# Altium integrated library Altium_Power_Supply_IC.IntLib: 99 symbols (part 3 of 3)
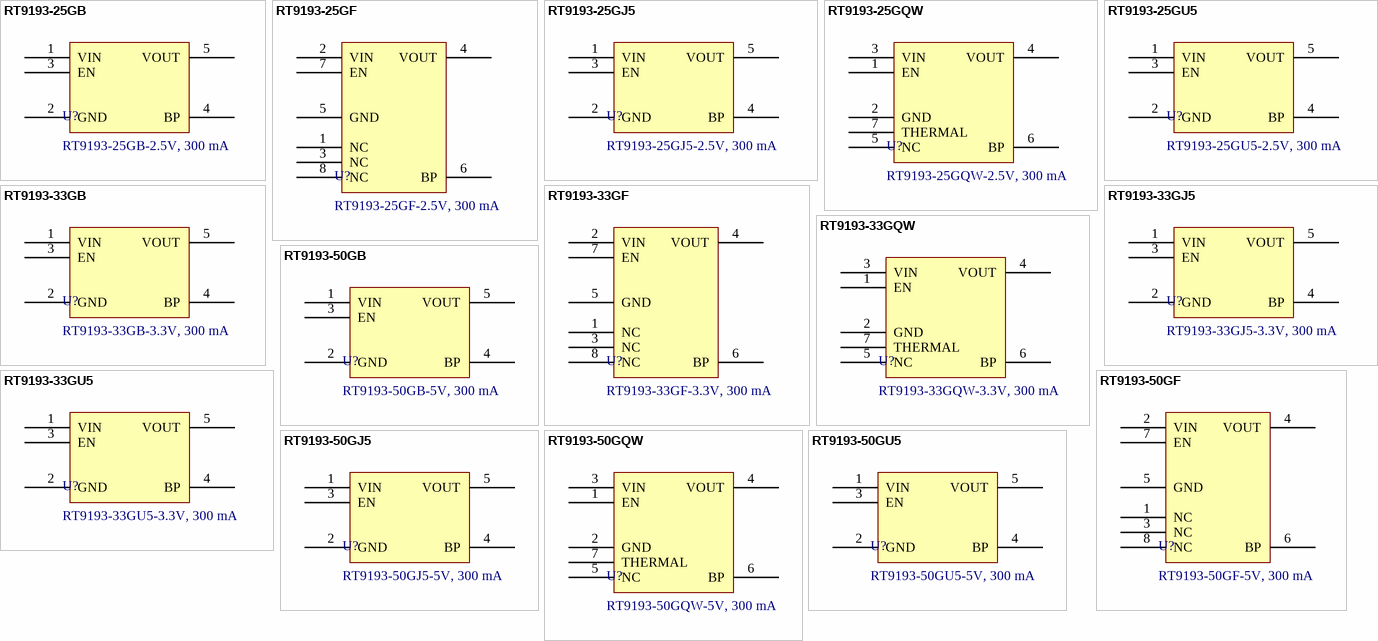
[diagram p13: symbols RT9193-25GB to RT9193-50GU5]

## RT9193-25GJ5
designator U?, comment RT9193-25GJ5-2.5V, 300 mA
LDO Voltage Regulators 300mA, Ultra-Low Noise, Ultra-Fast CMOS LDO Regulator, TSOT-23-5, 2.5V; Manufacturer: Richtek; Rated Current: 90 uA; PSRR: - 70 dB; Voltage Drop: 220 mV; Voltage Input Maximum: 5.5V; Product: LDO Voltage Regulators; Packaging: Tape and Reel; Voltage Output: 2.5V; Current Output: 300 mA; Voltage Input Minimum: 2.5V; Supplier 1 URL: N/A; Supplier 2 URL: https://www.digikey.com/en/products/detail/richtek-usa-inc/RT9193-25GJ5/2546925?s=N4IgTCBcDaIEoBUCcBGJBmAtGArAcQCkcQBdAXyA; Supplier 3 URL: N/A; Value: RT9193-25GJ5-2.5V, 300 mA; Manufacturer Part Number: RT9193-25GJ5; Mount: SMD/SMT; Operating Temperature Max: + 85 C; Operating Temperature Min: - 40 C; Package / Case: TSOT-23-5; Supplier 1: Mouser; Supplier 1 Part Number: N/A; Supplier 2: Digi-Key; Supplier 2 Part Number: RT9193-25GJ5-ND; Supplier 3: thegioiic; Supplier 3 Part Number: N/A; ComponentLink1Description: Datasheet; ComponentLink1URL: https://www.mouser.vn/datasheet/2/1458/DS9193_18-3104722.pdf; LCSC Part #: N/A
footprint RT9193-xxGJ5 (SOT23, 5-Leads, Body 2.90x2.80mm, Pitch 0.95mm, IPC Medium Density)
pins: 1 VIN (power), 2 GND (power), 3 EN (power), 4 BP (power), 5 VOUT (power)

## RT9193-25GQW
designator U?, comment RT9193-25GQW-2.5V, 300 mA
LDO Voltage Regulators 300mA, Ultra-Low Noise, Ultra-Fast CMOS LDO Regulator, WDFN-6L 2x2 (W-Type), 2.5V; Manufacturer: Richtek; Rated Current: 90 uA; PSRR: - 70 dB; Voltage Drop: 220 mV; Voltage Input Maximum: 5.5V; Product: LDO Voltage Regulators; Packaging: Tape and Reel; Voltage Output: 2.5V; Current Output: 300 mA; Voltage Input Minimum: 2.5V; Supplier 1 URL: N/A; Supplier 2 URL: https://www.digikey.com/en/products/detail/richtek-usa-inc/RT9193-25GQW/2546927?s=N4IgTCBcDaIEoBUCcBGJBmAtGArAcQEUB1EAXQF8g; Supplier 3 URL: N/A; Value: RT9193-25GQW-2.5V, 300 mA; Manufacturer Part Number: RT9193-25GQW; Mount: SMD/SMT; Operating Temperature Max: + 85 C; Operating Temperature Min: - 40 C; Package / Case: WDFN-6L 2x2 (W-Type); Supplier 1: Mouser; Supplier 1 Part Number: N/A; Supplier 2: Digi-Key; Supplier 2 Part Number: RT9193-25GQW-ND; Supplier 3: thegioiic; Supplier 3 Part Number: N/A; ComponentLink1Description: Datasheet; ComponentLink1URL: https://www.mouser.vn/datasheet/2/1458/DS9193_18-3104722.pdf; LCSC Part #: N/A
footprint RT9193-xxGQW (SON, 6-Leads, Body 2.00x2.00mm, Pitch 0.65mm, Thermal Pad 1.23x0.68mm, IPC Medium Density)
pins: 1 EN (power), 2 GND (power), 3 VIN (power), 4 VOUT (power), 5 NC (power), 6 BP (power), 7 THERMAL (power)

## RT9193-25GU5
designator U?, comment RT9193-25GU5-2.5V, 300 mA
LDO Voltage Regulators 300mA, Ultra-Low Noise, Ultra-Fast CMOS LDO Regulator, SC-70-5, 2.5V; Manufacturer: Richtek; Rated Current: 90 uA; PSRR: - 70 dB; Voltage Drop: 220 mV; Voltage Input Maximum: 5.5V; Product: LDO Voltage Regulators; Packaging: Tape and Reel; Voltage Output: 2.5V; Current Output: 300 mA; Voltage Input Minimum: 2.5V; Supplier 1 URL: N/A; Supplier 2 URL: https://www.digikey.com/en/products/detail/richtek-usa-inc/RT9193-25GU5/2546929?s=N4IgTCBcDaIEoBUCcBGJBmAtGArAcQFUcQBdAXyA; Supplier 3 URL: N/A; Value: RT9193-25GU5-2.5V, 300 mA; Manufacturer Part Number: RT9193-25GU5; Mount: SMD/SMT; Operating Temperature Max: + 85 C; Operating Temperature Min: - 40 C; Package / Case: SC-70-5; Supplier 1: Mouser; Supplier 1 Part Number: N/A; Supplier 2: Digi-Key; Supplier 2 Part Number: RT9193-25GU5-ND; Supplier 3: thegioiic; Supplier 3 Part Number: N/A; ComponentLink1Description: Datasheet; ComponentLink1URL: https://www.mouser.vn/datasheet/2/1458/DS9193_18-3104722.pdf; LCSC Part #: N/A
footprint RT9193-xxGU5 (SOT23, 5-Leads, Body 2.03x2.13mm, Pitch 0.65mm, IPC Medium Density)
pins: 1 VIN (power), 2 GND (power), 3 EN (power), 4 BP (power), 5 VOUT (power)

## RT9193-33GB
designator U?, comment RT9193-33GB-3.3V, 300 mA
LDO Voltage Regulators 300mA, Ultra-Low Noise, Ultra-Fast CMOS LDO Regulator, SOT-23-5,  3.3 V; Manufacturer: Richtek; Voltage Output: 3.3V; Rated Current: 90 uA; Voltage Input Minimum: 2.5V; PSRR: - 70 dB; Voltage Drop: 220 mV; Voltage Input Maximum: 5.5V; Packaging: Tape and Reel; Current Output: 300 mA; Product: LDO Voltage Regulators; Supplier 1 URL: https://www.mouser.vn/ProductDetail/Richtek/RT9193-33GB?qs=amGC7iS6iy8ybRcZ9Wn2ww%3D%3D; Supplier 2 URL: https://www.digikey.com/en/products/detail/richtek-usa-inc/RT9193-33GB/2470048?s=N4IgTCBcDaIEoBUCcBGJBmAtO9BxAQiALoC%2BQA; Supplier 3 URL: N/A; Value: RT9193-33GB-3.3V, 300 mA; Manufacturer Part Number: RT9193-33GB; Mount: SMD/SMT; Operating Temperature Max: + 85 C; Operating Temperature Min: - 40 C; Package / Case: SOT-23-5; Supplier 1: Mouser; Supplier 1 Part Number: 835-RT9193-33GB; Supplier 2: Digi-Key; Supplier 2 Part Number: 1028-1014-6-ND; Supplier 3: thegioiic; Supplier 3 Part Number: N/A; ComponentLink1Description: Datasheet; ComponentLink1URL: https://www.mouser.vn/datasheet/2/1458/DS9193_18-3104722.pdf; LCSC Part #: C15651
footprint RT9193-xxGB (SOT23, 5-Leads, Body 2.90x2.79mm, Pitch 0.95mm, IPC Medium Density)
pins: 1 VIN (power), 2 GND (power), 3 EN (power), 4 BP (power), 5 VOUT (power)

## RT9193-33GF
designator U?, comment RT9193-33GF-3.3V, 300 mA
LDO Voltage Regulators 300mA, Ultra-Low Noise, Ultra-Fast CMOS LDO Regulator, MSOP-8, 3.3V; Manufacturer: Richtek; Rated Current: 90 uA; Voltage Input Minimum: 2.5V; PSRR: - 70 dB; Voltage Drop: 220 mV; Voltage Input Maximum: 5.5V; Product: LDO Voltage Regulators; Packaging: Tape and Reel; Voltage Output: 3.3V; Current Output: 300 mA; Supplier 1 URL: N/A; Supplier 2 URL: https://www.digikey.com/en/products/detail/richtek-usa-inc/RT9193-33GF/2546969?s=N4IgTCBcDaIEoBUCcBGJBmAtO9BxAYiALoC%2BQA; Supplier 3 URL: N/A; Value: RT9193-33GF-3.3V, 300 mA; Manufacturer Part Number: RT9193-33GF; Mount: SMD/SMT; Operating Temperature Max: + 85 C; Operating Temperature Min: - 40 C; Package / Case: MSOP-8; Supplier 1: Mouser; Supplier 1 Part Number: N/A; Supplier 2: Digi-Key; Supplier 2 Part Number: 1028-RT9193-33GFTR-ND; Supplier 3: thegioiic; Supplier 3 Part Number: N/A; ComponentLink1Description: Datasheet; ComponentLink1URL: https://www.mouser.vn/datasheet/2/1458/DS9193_18-3104722.pdf; LCSC Part #: N/A
footprint RT9193-xxGF (TSOP, 8-Leads, Body 3.00x3.00mm, Pitch 0.65mm, IPC Medium Density)
pins: 1 NC (power), 2 VIN (power), 3 NC (power), 4 VOUT (power), 5 GND (power), 6 BP (power), 7 EN (power), 8 NC (power)

## RT9193-33GJ5
designator U?, comment RT9193-33GJ5-3.3V, 300 mA
LDO Voltage Regulators 300mA, Ultra-Low Noise, Ultra-Fast CMOS LDO Regulator, TSOT-23-5, 3.3V; Manufacturer: Richtek; Rated Current: 90 uA; Voltage Input Minimum: 2.5V; PSRR: - 70 dB; Voltage Drop: 220 mV; Voltage Input Maximum: 5.5V; Product: LDO Voltage Regulators; Packaging: Tape and Reel; Voltage Output: 3.3V; Current Output: 300 mA; Supplier 1 URL: N/A; Supplier 2 URL: https://www.digikey.com/en/products/detail/richtek-usa-inc/RT9193-33GJ5/2546971?s=N4IgTCBcDaIEoBUCcBGJBmAtO9BxAUgKwgC6AvkA; Supplier 3 URL: N/A; Value: RT9193-33GJ5-3.3V, 300 mA; Manufacturer Part Number: RT9193-33GJ5; Mount: SMD/SMT; Operating Temperature Max: + 85 C; Operating Temperature Min: - 40 C; Package / Case: TSOT-23-5; Supplier 1: Mouser; Supplier 1 Part Number: N/A; Supplier 2: Digi-Key; Supplier 2 Part Number: RT9193-33GJ5-ND; Supplier 3: thegioiic; Supplier 3 Part Number: N/A; ComponentLink1Description: Datasheet; ComponentLink1URL: https://www.mouser.vn/datasheet/2/1458/DS9193_18-3104722.pdf; LCSC Part #: N/A
footprint RT9193-xxGJ5 (SOT23, 5-Leads, Body 2.90x2.80mm, Pitch 0.95mm, IPC Medium Density)
pins: 1 VIN (power), 2 GND (power), 3 EN (power), 4 BP (power), 5 VOUT (power)

## RT9193-33GQW
designator U?, comment RT9193-33GQW-3.3V, 300 mA
LDO Voltage Regulators 300mA, Ultra-Low Noise, Ultra-Fast CMOS LDO Regulator, WDFN-6L 2x2 (W-Type), 3.3V; Manufacturer: Richtek; Rated Current: 90 uA; Voltage Input Minimum: 2.5V; PSRR: - 70 dB; Voltage Drop: 220 mV; Voltage Input Maximum: 5.5V; Product: LDO Voltage Regulators; Packaging: Tape and Reel; Voltage Output: 3.3V; Current Output: 300 mA; Supplier 1 URL: N/A; Supplier 2 URL: https://www.digikey.com/en/products/detail/richtek-usa-inc/RT9193-33GQW/2546973?s=N4IgTCBcDaIEoBUCcBGJBmAtO9BxAigOogC6AvkA; Supplier 3 URL: N/A; Value: RT9193-33GQW-3.3V, 300 mA; Manufacturer Part Number: RT9193-33GQW; Mount: SMD/SMT; Operating Temperature Max: + 85 C; Operating Temperature Min: - 40 C; Package / Case: WDFN-6L 2x2 (W-Type); Supplier 1: Mouser; Supplier 1 Part Number: N/A; Supplier 2: Digi-Key; Supplier 2 Part Number: RT9193-33GQW-ND; Supplier 3: thegioiic; Supplier 3 Part Number: N/A; ComponentLink1Description: Datasheet; ComponentLink1URL: https://www.mouser.vn/datasheet/2/1458/DS9193_18-3104722.pdf; LCSC Part #: N/A
footprint RT9193-xxGQW (SON, 6-Leads, Body 2.00x2.00mm, Pitch 0.65mm, Thermal Pad 1.23x0.68mm, IPC Medium Density)
pins: 1 EN (power), 2 GND (power), 3 VIN (power), 4 VOUT (power), 5 NC (power), 6 BP (power), 7 THERMAL (power)

## RT9193-33GU5
designator U?, comment RT9193-33GU5-3.3V, 300 mA
LDO Voltage Regulators 300mA, Ultra-Low Noise, Ultra-Fast CMOS LDO Regulator, SC-70-5, 3.3V; Manufacturer: Richtek; Rated Current: 90 uA; Voltage Input Minimum: 2.5V; PSRR: - 70 dB; Voltage Drop: 220 mV; Voltage Input Maximum: 5.5V; Product: LDO Voltage Regulators; Packaging: Tape and Reel; Voltage Output: 3.3V; Current Output: 300 mA; Supplier 1 URL: N/A; Supplier 2 URL: https://www.digikey.com/en/products/detail/richtek-usa-inc/RT9193-33GU5/2546976?s=N4IgTCBcDaIEoBUCcBGJBmAtO9BxAqgKwgC6AvkA; Supplier 3 URL: N/A; Value: RT9193-33GU5-3.3V, 300 mA; Manufacturer Part Number: RT9193-33GU5; Mount: SMD/SMT; Operating Temperature Max: + 85 C; Operating Temperature Min: - 40 C; Package / Case: SC-70-5; Supplier 1: Mouser; Supplier 1 Part Number: N/A; Supplier 2: Digi-Key; Supplier 2 Part Number: RT9193-33GU5-ND; Supplier 3: thegioiic; Supplier 3 Part Number: N/A; ComponentLink1Description: Datasheet; ComponentLink1URL: https://www.mouser.vn/datasheet/2/1458/DS9193_18-3104722.pdf; LCSC Part #: N/A
footprint RT9193-xxGU5 (SOT23, 5-Leads, Body 2.03x2.13mm, Pitch 0.65mm, IPC Medium Density)
pins: 1 VIN (power), 2 GND (power), 3 EN (power), 4 BP (power), 5 VOUT (power)

## RT9193-50GB
designator U?, comment RT9193-50GB-5V, 300 mA
LDO Voltage Regulators 300mA, Ultra-Low Noise, Ultra-Fast CMOS LDO Regulator, SOT-23-5, 5V; Manufacturer: Richtek; Rated Current: 90 uA; Voltage Input Minimum: 2.5V; PSRR: - 70 dB; Voltage Drop: 220 mV; Voltage Input Maximum: 5.5V; Product: LDO Voltage Regulators; Packaging: Tape and Reel; Voltage Output: 5V; Current Output: 300 mA; Supplier 1 URL: N/A; Supplier 2 URL: N/A; Supplier 3 URL: N/A; Value: RT9193-50GB-5V, 300 mA; Manufacturer Part Number: RT9193-50GB; Mount: SMD/SMT; Operating Temperature Max: + 85 C; Operating Temperature Min: - 40 C; Package / Case: SOT-23-5; Supplier 1: Mouser; Supplier 1 Part Number: N/A; Supplier 2: Digi-Key; Supplier 2 Part Number: N/A; Supplier 3: thegioiic; Supplier 3 Part Number: N/A; ComponentLink1Description: Datasheet; ComponentLink1URL: https://www.mouser.vn/datasheet/2/1458/DS9193_18-3104722.pdf; LCSC Part #: N/A
footprint RT9193-xxGB (SOT23, 5-Leads, Body 2.90x2.79mm, Pitch 0.95mm, IPC Medium Density)
pins: 1 VIN (power), 2 GND (power), 3 EN (power), 4 BP (power), 5 VOUT (power)

## RT9193-50GF
designator U?, comment RT9193-50GF-5V, 300 mA
LDO Voltage Regulators 300mA, Ultra-Low Noise, Ultra-Fast CMOS LDO Regulator, MSOP-8, 5V; Manufacturer: Richtek; Rated Current: 90 uA; Voltage Input Minimum: 2.5V; PSRR: - 70 dB; Voltage Drop: 220 mV; Voltage Input Maximum: 5.5V; Product: LDO Voltage Regulators; Packaging: Tape and Reel; Voltage Output: 5V; Current Output: 300 mA; Supplier 1 URL: N/A; Supplier 2 URL: N/A; Supplier 3 URL: N/A; Value: RT9193-50GF-5V, 300 mA; Manufacturer Part Number: RT9193-50GF; Mount: SMD/SMT; Operating Temperature Max: + 85 C; Operating Temperature Min: - 40 C; Package / Case: MSOP-8; Supplier 1: Mouser; Supplier 1 Part Number: N/A; Supplier 2: Digi-Key; Supplier 2 Part Number: N/A; Supplier 3: thegioiic; Supplier 3 Part Number: N/A; ComponentLink1Description: Datasheet; ComponentLink1URL: https://www.mouser.vn/datasheet/2/1458/DS9193_18-3104722.pdf; LCSC Part #: N/A
footprint RT9193-xxGF (TSOP, 8-Leads, Body 3.00x3.00mm, Pitch 0.65mm, IPC Medium Density)
pins: 1 NC (power), 2 VIN (power), 3 NC (power), 4 VOUT (power), 5 GND (power), 6 BP (power), 7 EN (power), 8 NC (power)

## RT9193-50GJ5
designator U?, comment RT9193-50GJ5-5V, 300 mA
LDO Voltage Regulators 300mA, Ultra-Low Noise, Ultra-Fast CMOS LDO Regulator, TSOT-23-5, 5V; Manufacturer: Richtek; Rated Current: 90 uA; Voltage Input Minimum: 2.5V; PSRR: - 70 dB; Voltage Drop: 220 mV; Voltage Input Maximum: 5.5V; Product: LDO Voltage Regulators; Packaging: Tape and Reel; Voltage Output: 5V; Current Output: 300 mA; Supplier 1 URL: N/A; Supplier 2 URL: N/A; Supplier 3 URL: N/A; Value: RT9193-50GJ5-5V, 300 mA; Manufacturer Part Number: RT9193-50GJ5; Mount: SMD/SMT; Operating Temperature Max: + 85 C; Operating Temperature Min: - 40 C; Package / Case: TSOT-23-5; Supplier 1: Mouser; Supplier 1 Part Number: N/A; Supplier 2: Digi-Key; Supplier 2 Part Number: N/A; Supplier 3: thegioiic; Supplier 3 Part Number: N/A; ComponentLink1Description: Datasheet; ComponentLink1URL: https://www.mouser.vn/datasheet/2/1458/DS9193_18-3104722.pdf; LCSC Part #: N/A
footprint RT9193-xxGJ5 (SOT23, 5-Leads, Body 2.90x2.80mm, Pitch 0.95mm, IPC Medium Density)
pins: 1 VIN (power), 2 GND (power), 3 EN (power), 4 BP (power), 5 VOUT (power)

## RT9193-50GQW
designator U?, comment RT9193-50GQW-5V, 300 mA
LDO Voltage Regulators 300mA, Ultra-Low Noise, Ultra-Fast CMOS LDO Regulator, WDFN-6L 2x2 (W-Type), 5V; Manufacturer: Richtek; Rated Current: 90 uA; Voltage Input Minimum: 2.5V; PSRR: - 70 dB; Voltage Drop: 220 mV; Voltage Input Maximum: 5.5V; Product: LDO Voltage Regulators; Packaging: Tape and Reel; Voltage Output: 5V; Current Output: 300 mA; Supplier 1 URL: N/A; Supplier 2 URL: N/A; Supplier 3 URL: N/A; Value: RT9193-50GQW-5V, 300 mA; Manufacturer Part Number: RT9193-50GQW; Mount: SMD/SMT; Operating Temperature Max: + 85 C; Operating Temperature Min: - 40 C; Package / Case: WDFN-6L 2x2 (W-Type); Supplier 1: Mouser; Supplier 1 Part Number: N/A; Supplier 2: Digi-Key; Supplier 2 Part Number: N/A; Supplier 3: thegioiic; Supplier 3 Part Number: N/A; ComponentLink1Description: Datasheet; ComponentLink1URL: https://www.mouser.vn/datasheet/2/1458/DS9193_18-3104722.pdf; LCSC Part #: N/A
footprint RT9193-xxGQW (SON, 6-Leads, Body 2.00x2.00mm, Pitch 0.65mm, Thermal Pad 1.23x0.68mm, IPC Medium Density)
pins: 1 EN (power), 2 GND (power), 3 VIN (power), 4 VOUT (power), 5 NC (power), 6 BP (power), 7 THERMAL (power)

## RT9193-50GU5
designator U?, comment RT9193-50GU5-5V, 300 mA
LDO Voltage Regulators 300mA, Ultra-Low Noise, Ultra-Fast CMOS LDO Regulator, SC-70-5, 5V; Manufacturer: Richtek; Rated Current: 90 uA; Voltage Input Minimum: 2.5V; PSRR: - 70 dB; Voltage Drop: 220 mV; Voltage Input Maximum: 5.5V; Product: LDO Voltage Regulators; Packaging: Tape and Reel; Voltage Output: 5V; Current Output: 300 mA; Supplier 1 URL: N/A; Supplier 2 URL: N/A; Supplier 3 URL: N/A; Value: RT9193-50GU5-5V, 300 mA; Manufacturer Part Number: RT9193-50GU5; Mount: SMD/SMT; Operating Temperature Max: + 85 C; Operating Temperature Min: - 40 C; Package / Case: SC-70-5; Supplier 1: Mouser; Supplier 1 Part Number: N/A; Supplier 2: Digi-Key; Supplier 2 Part Number: N/A; Supplier 3: thegioiic; Supplier 3 Part Number: N/A; ComponentLink1Description: Datasheet; ComponentLink1URL: https://www.mouser.vn/datasheet/2/1458/DS9193_18-3104722.pdf; LCSC Part #: N/A
footprint RT9193-xxGU5 (SOT23, 5-Leads, Body 2.03x2.13mm, Pitch 0.65mm, IPC Medium Density)
pins: 1 VIN (power), 2 GND (power), 3 EN (power), 4 BP (power), 5 VOUT (power)


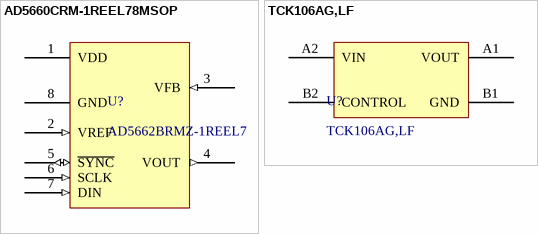
[diagram p9: symbols AD5660CRM-1REEL78MSOP to TCK106AG,LF]

## AD5660CRM-1REEL78MSOP
designator U?, comment AD5662BRMZ-1REEL7
IC DAC 16BIT V-OUT 8MSOP,; Manufacturer: Analog Devices; Number of Converters: 1; Power Dissipation: 5 mW; Sampling Rate: 125 kS/s; Supply Voltage - Max: 5.5 V; Supply Voltage - Min: 2.7 V; Resolution: 16 bit; Supplier 1 URL: https://www.mouser.vn/ProductDetail/Analog-Devices/AD5662BRMZ-1REEL7?qs=NmRFExCfTkGSnX5okAm7Ig%3D%3D; Supplier 2 URL: https://www.digikey.com/en/products/detail/analog-devices-inc/ad5662brmz-1reel7/1198991; Supplier 3 URL: N/A; Value: AD5662BRMZ-1REEL7; Supplier 1: Mouser; Supplier 1 Part Number: 584-AD5662BRMZ-1R7; Supplier 2: Digi-Key; Supplier 2 Part Number: AD5662BRMZ-1REEL7TR-ND; Supplier 3: thegioiic; Supplier 3 Part Number: N/A; Manufacturer Part Number: AD5662BRMZ-1REEL7; Mount: SMD/SMT; Operating Temperature Max: + 85 C; Operating Temperature Min: - 40 C; Package / Case: MSOP-8; Packaging: Tape and Reel; ComponentLink1Description: Datasheet; ComponentLink1URL: https://www.analog.com/media/en/technical-documentation/data-sheets/AD5620_5640_5660.pdf
footprint AD5662xx family (TSOP, 8-Leads, Body 3.00x3.00mm, Pitch 0.65mm, IPC Medium Density)
pins: 1 VDD (power), 2 VREF (in), 3 VFB (in), 4 VOUT (out), 5 ~{SYNC} (io), 6 SCLK (in), 7 DIN (in), 8 GND (power)

## TCK106AG,LF
designator U?
Power Switch ICs - Power Distribution Load Switch IC; Manufacturer: Toshiba; Current Output: 1 A; PSRR: - 70 dB; Rated Current: 90 uA; Voltage Input Maximum: 5.5V; Voltage Input Minimum: 1.1V; Voltage Output: 5V; Off time: 5 us; On Resistor: 55 mOhms; On time: 305 us; Pd - Power Dissipation: 800 mW; Manufacturer Part Number: TCK106AG,LF; Packaging: Tape and Reel; Product: LDO Voltage Regulators; Supplier 1 URL: https://www.mouser.vn/ProductDetail/Toshiba/TCK106AGLF?qs=lX6dEUlT%252BgdlAjab8mTlWw%3D%3D; Supplier 2 URL: https://www.digikey.com/en/products/detail/toshiba-semiconductor-and-storage/TCK106AG-LF/5409248; Supplier 3 URL: N/A; Value: TCK106AG,LF; Mount: SMD/SMT; Operating Temperature Max: + 85 C; Operating Temperature Min: - 40 C; Package / Case: BGA; Supplier 1: Mouser; Supplier 1 Part Number: 757-TCK106AGLF; Supplier 2: Digi-Key; Supplier 2 Part Number: TCK106AGLFTR-ND; Supplier 3: thegioiic; Supplier 3 Part Number: N/A; ComponentLink1Description: Datasheet; ComponentLink1URL: https://www.mouser.vn/datasheet/2/408/TCK106AG_datasheet_en_20151005-1916439.pdf
footprint TCK106AG,LF (BGA, 4-Leads, Body 0.79x0.79mmx0.35mm, Pitch 0.40mm)
pins: A1 VOUT, A2 VIN, B1 GND, B2 CONTROL


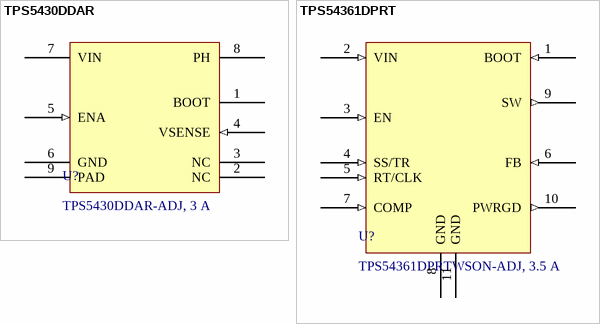
[diagram p10: symbols TPS5430DDAR to TPS54361DPRT]

## TPS5430DDAR
designator U?, comment TPS5430DDAR-ADJ, 3 A
5.5V to 36V Input, 3A, 500kHz Step-Down Converter; Manufacturer: Texas Instruments; Number of Outputs: 1; Output Voltage: 1.22V - 32V; Package / Case: WSON-10; Output Current: 3 A; Supplier 1 URL: https://www.mouser.com/ProductDetail/Texas-Instruments/TPS5430DDAR?qs=zwk82MlA57ZJdOTovH1aYA%3D%3D; Supplier 2 URL: https://www.digikey.com/en/products/detail/texas-instruments/tps5430ddar/1671816; Supplier 3 URL: https://www.thegioiic.com/tps5430dda-ic-dieu-chinh-giam-ap-3a-8-soic; Value: TPS5430DDAR-ADJ, 3 A; Voltage Input Maximum: 36V; Voltage Input Minimum: 5.5V; Voltage Output: 1.22V - 32V; Switching Frequency: 500 kHz; Manufacturer Part Number: TPS5430DDAR; Mount: SMD/SMT; Operating Temperature Max: + 85 C; Operating Temperature Min: - 40 C; Packaging: Tape and Reel; Supplier 1: Mouser; Supplier 1 Part Number: 595-TPS5430DDAR; Supplier 2: Digi-Key; Supplier 2 Part Number: 296-26988-2-ND; Supplier 3: thegioiic; Supplier 3 Part Number: TPS5430DDA; ComponentLink1Description: Datasheet; ComponentLink1URL: https://www.ti.com/lit/gpn/TPS5430; LCSC Part #: C9864
footprint TPS5430DDAR (SOP, 8-Leads, Body 4.90x3.90mm, Pitch 1.27mm, Thermal Pad 3.10x2.60mm, IPC Medium Density)
footprint TPS5430DDAR - BIG_VIA (SOP, 8-Leads, Body 4.90x3.90mm, Pitch 1.27mm, Thermal Pad 3.10x2.60mm, IPC Medium Density)
pins: 1 BOOT, 2 NC, 3 NC, 4 VSENSE (in), 5 ENA (in), 6 GND (power), 7 VIN (power), 8 PH (power), 9 PAD (power)

## TPS54361DPRT
designator U?, comment TPS54361DPRTWSON-ADJ, 3.5 A
Switching Voltage Regulators, 800 mV to 59 V output; Manufacturer: Texas Instruments; Number of Outputs: 1; Output Voltage: 0.8V - 59V; Output Current: 3.5 A; Voltage Input Maximum: 60V; Voltage Input Minimum: 4.5V; Switching Frequency: 500 kHz; Package / Case: WSON-10; Supplier 1 URL: https://www.mouser.vn/ProductDetail/Texas-Instruments/TPS54361DPRT?qs=wrT8kFYR778NnxU7eySXLw%3D%3D; Supplier 2 URL: https://www.digikey.com/en/products/detail/texas-instruments/TPS54361DPRT/4695367?s=N4IgTCBcDaICoAUDKBWALAZgGwEYAiCASnCALoC%2BQA; Supplier 3 URL: N/A; Value: TPS54361DPRTWSON-ADJ, 3.5 A; Voltage Output: 0.8V - 59V; Manufacturer Part Number: TPS54361DPRT; Mount: SMD/SMT; Operating Temperature Max: + 85 C; Operating Temperature Min: - 40 C; Packaging: Tape and Reel; Supplier 1: Mouser; Supplier 1 Part Number: 595-TPS54361DPRT; Supplier 2: Digi-Key; Supplier 2 Part Number: 296-37248-2-ND; Supplier 3: thegioiic; Supplier 3 Part Number: N/A; ComponentLink1Description: Datasheet; ComponentLink1URL: https://www.ti.com/general/docs/suppproductinfo.tsp?distId=10&gotoUrl=https%3A%2F%2Fwww.ti.com%2Flit%2Fgpn%2Ftps54361; LCSC Part #: N/A
footprint TPS54361DPRT
pins: 1 BOOT (in), 2 VIN (in), 3 EN (in), 4 SS/TR  (in), 5 RT/CLK  (in), 6 FB (in), 7 COMP (in), 8 GND (power), 9 SW (out), 10 PWRGD (out), 11 GND (power)


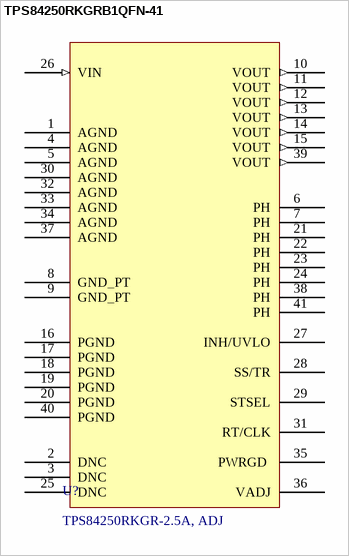
[diagram p11: symbol TPS84250RKGRB1QFN-41]

## TPS84250RKGRB1QFN-41
designator U?, comment TPS84250RKGR-2.5A, ADJ
Switching Voltage Regulators, 2.5V to 15V output; Manufacturer: Texas Instruments; Voltage Input Maximum: 50V; Voltage Input Minimum: 7V; Voltage Output: 2.5-15 V; Current Output Maximum: 2.5 A; Package / Case: B1QFN-41; ComponentLink2Description: Datasheet; ComponentLink2URL: http://www.ti.com/lit/ds/symlink/tps84250.pdf; Supplier 1 URL: https://www.mouser.com/ProductDetail/Texas-Instruments/TPS84250RKGR?qs=4whTb%2F0XQMjhZkugPH%2FKDw%3D%3D; Supplier 2 URL: https://www.digikey.com/en/products/detail/texas-instruments/TPS84250RKGR/3661876; Supplier 3 URL: N/A; Value: TPS84250RKGR-2.5A, ADJ; Manufacturer Part Number: TPS84250RKGR; Mount: SMD/SMT; Operating Temperature Max: + 85 C; Operating Temperature Min: - 40 C; Packaging: Tape and Reel; Supplier 1: Mouser; Supplier 1 Part Number: 595-TPS84250RKGR; Supplier 2: Digi-Key; Supplier 2 Part Number: 296-34944-2-ND; Supplier 3: thegioiic; Supplier 3 Part Number: N/A
footprint TPS84250RKGR
pins: 1 AGND, 2 DNC, 3 DNC, 4 AGND, 5 AGND, 6 PH, 7 PH, 8 GND_PT, 9 GND_PT, 10 VOUT (out), 11 VOUT (out), 12 VOUT (out), 13 VOUT (out), 14 VOUT (out), 15 VOUT (out), 16 PGND, 17 PGND, 18 PGND, 19 PGND, 20 PGND, 21 PH, 22 PH, 23 PH, 24 PH, 25 DNC, 26 VIN (in), 27 INH/UVLO, 28 SS/TR, 29 STSEL, 30 AGND, 31 RT/CLK, 32 AGND, 33 AGND, 34 AGND, 35 PWRGD , 36 VADJ, 37 AGND, 38 PH, 39 VOUT (out), 40 PGND, 41 PH